# Altium footprint library Passive-Cap.PcbLib: 70 footprints (part 5 of 5)
Each footprint in its own frame and in the unit in brackets; x right, y up, seen from the top. Pads: shape width x height; smd on the part's side, far side on the other; paste and mask are expansions set on the pad; w line width, h text height; cw(c..) or ccw(c..) is an arc to the next point about the centre after c.
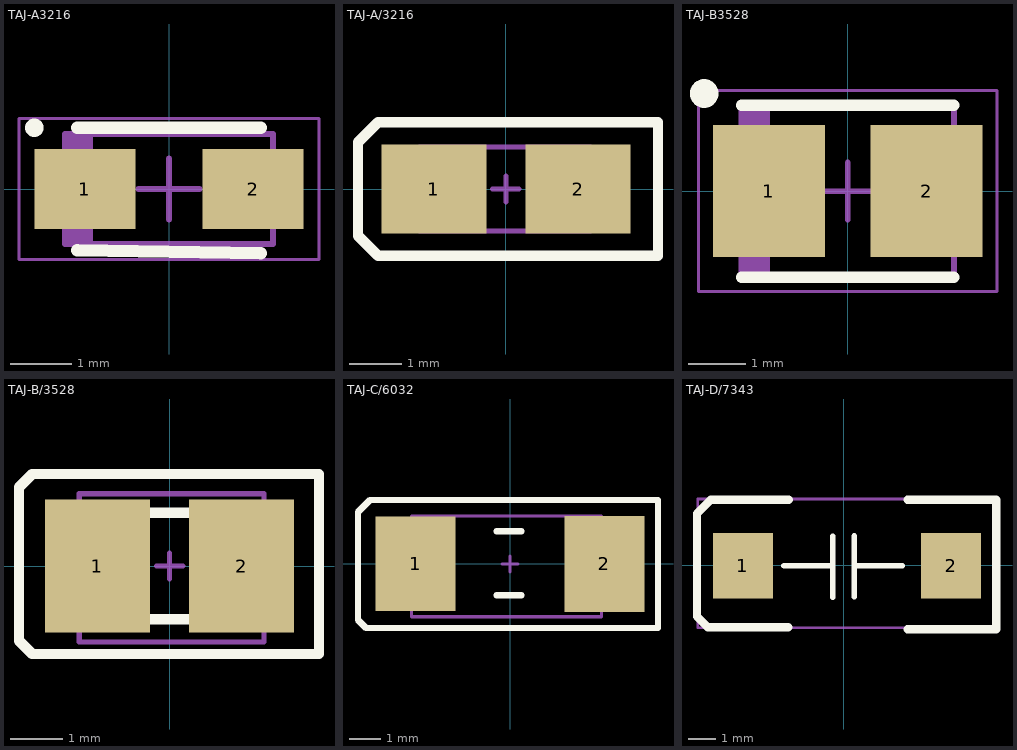
[diagram p4: the footprints below, top view; thin cyan lines are the x and y axes]

## TAJ-A3216 [mm] "Molded Capacitor, 2-Leads, Body 3.20x1.65mm, IPC Medium Density"
height 1.6
pads (2):
  rect 1.65x1.3 smd: 1(-1.375,0) 2(1.375,0)
Top Overlay:
  circle w0.2: c-2.2,1 r0.05
  lines w0.2: -1.5,-1 1.5,-1.05 ; -1.5,1 1.5,1
Top Value:
  text "'.Comment'" at -3.453,-0.465 h1.6
Top Designator:
  text "'.Designator'" at -4.579,-0.335 h1.6
Top Courtyard:
  lines w0.05: -2.45,-1.15 2.45,-1.15 2.45,1.15 -2.45,1.15 -2.45,-1.15
  lines w0.1: -0.5,0 0.5,0 ; 0,-0.5 0,0.5
Top Assembly:
  rectangle: -1.7,-0.9 -1.243,0.9
  lines w0.1: -1.7,-0.9 -1.7,0.9 1.7,0.9 1.7,-0.9 -1.7,-0.9
3D body "TAJ-A.STEP": height 1.6, standoff 0, extent -1.625,-0.8 1.575,0.8

## TAJ-A/3216 [mm]
pads (2):
  rect 2x1.7 smd: 1(-1.373,0) 2(1.373,0)
Top Overlay:
  lines w0.2: 2.897,-1.016 2.897,1.27 -2.437,1.27 -2.818,0.889 -2.818,-0.889 -2.437,-1.27 2.897,-1.27 2.897,1.016
Top Component Outline:
  lines w0.1: -1.646,-0.8 1.605,-0.8 1.605,0.8 -1.646,0.8 -1.646,-0.8
Top Component Center:
  lines w0.1: -0.25,0 0.25,0 ; 0,-0.25 0,0.25
Top Value:
  text "'.Comment'" at -2.202,-0.304 h1.02
Top Designator:
  text ".Designator" at -3.774,-0.319 h1.52
3D body "TAJ-A.STEP": height 1.6, standoff 0, extent -1.625,-0.8 1.575,0.8

## TAJ-B3528 [mm] "Molded Capacitor, 2-Leads, Body 3.50x2.85mm, IPC Medium Density"
height 1.9
pads (2):
  rect 1.95x2.3 smd: 1(-1.375,0) 2(1.375,0)
Top Overlay:
  circle w0.25: c-2.5,1.7 r0.125
  lines w0.2: -1.85,-1.5 1.85,-1.5 ; -1.85,1.5 1.85,1.5
Top Value:
  text "'.Comment'" at -4.314,-0.581 h2
Top Designator:
  text "'.Designator'" at -5.721,-0.419 h2
Top Courtyard:
  lines w0.05: -2.6,-1.75 -2.6,1.75 2.6,1.75 2.6,-1.75 -2.6,-1.75
  lines w0.1: -0.5,0 0.5,0 ; 0,-0.5 0,0.5
Top Assembly:
  rectangle: -1.85,-1.5 -1.352,1.5
  lines w0.1: -1.85,-1.5 -1.85,1.5 1.85,1.5 1.85,-1.5 -1.85,-1.5
3D body "TAJ-B.STEP": height 1.9, standoff 0, extent -1.725,-1.425 1.775,1.375

## TAJ-B/3528 [mm]
pads (2):
  rect 2x2.54 smd: 1(-1.373,0) 2(1.373,0)
Top Overlay:
  lines w0.2: -0.405,-1.016 0.395,-1.016 ; -0.405,1.016 0.395,1.016 ; -2.868,-1.422 -2.614,-1.676 2.847,-1.676 2.847,1.753 -2.614,1.753 -2.868,1.499 -2.868,-1.422
Top Component Outline:
  lines w0.1: -1.72,-1.448 -1.72,1.377 1.801,1.377 1.801,-1.448 -1.72,-1.448
Top Component Center:
  lines w0.1: -0.25,0 0.25,0 ; 0,-0.25 0,0.25
Top Value:
  text "'.Comment'" at -2.202,-0.304 h1.02
Top Designator:
  text ".Designator" at -3.774,-0.319 h1.52
3D body "TAJ-B.STEP": height 1.9, standoff 0, extent -1.725,-1.425 1.775,1.375

## TAJ-C/6032 [mm]
pads (2):
  rect 2.54x3 smd: 1(-3,0)
  rect 2.54x3.048 smd: 2(3,0)
Top Overlay:
  lines w0.2: -0.432,-0.991 0.368,-0.991 ; -0.432,1.041 0.368,1.041 ; -4.826,-1.778 -4.572,-2.032 4.699,-2.032 4.699,0.863 4.699,2.032 -4.445,2.032 -4.826,1.651 -4.826,-1.778
Top Component Outline:
  lines w0.1: -3.125,-1.675 2.9,-1.675 2.9,1.525 -3.125,1.525 -3.125,-1.675
Top Component Center:
  lines w0.1: -0.25,0 0.25,0 ; 0,-0.25 0,0.25
Top Value:
  text "'.Comment'" at -2.202,-0.304 h1.02
Top Designator:
  text ".Designator" at -3.774,-0.319 h1.52
3D body "TAJ-C.STEP": height 2.6, standoff 0, extent -3,-1.6 3,1.6

## TAJ-D/7343 [mm]
pads (2):
  rect 2.2x2.4 smd: 1(-3.683,-0.025) 2(3.912,-0.025)
Top Overlay:
  lines w0.203: -2.184,-0.025 -0.406,-0.025 ; -0.406,-1.168 -0.406,1.052 ; 0.372,-1.16 0.372,1.06 ; 0.372,-0.025 2.134,-0.025
  lines w0.305: -2.032,-2.275 -4.964,-2.275 -5.359,-1.88 -5.359,1.88 -4.851,2.388 -2.007,2.388 ; 2.324,-2.337 5.563,-2.337 5.563,2.388 2.324,2.388
Bottom Courtyard:
  lines w0.1: -5.334,-2.286 -5.334,2.413 5.588,2.413 5.588,-2.286 -5.334,-2.286
  text ".Designator" at 7.009,-0.482 h1.52
3D body "TAJ-D.STEP": height 2.9, standoff 0, extent -3.523,-2.15 3.777,2.15